# EAGLE library part JW5017S (library EMSinterface_V1.0)
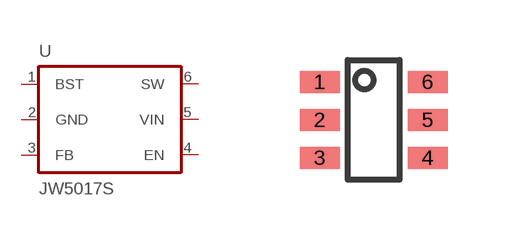
[diagram p0: symbol with the pads of SOT23-6; footprint SOT23-6]

Designator prefix -

## JW5017S  [SOT23-6]
1  BST  in
2  GND  pwr
3  FB  in
4  EN  in
5  VIN  pwr
6  SW  out

## Footprint SOT23-6 (pad centres in mm)
smd 1 x 0.55: 1 -1.35,0.95; 2 -1.35,0; 3 -1.35,-0.95; 4 1.35,-0.95; 5 1.35,0; 6 1.35,0.95